# EAGLE library part DISP_TFT28_PV02808LZR50H (library dp_devices.v6)
KINGTECH PV02808LZR50H 2.8" TFT 240x320 RGB
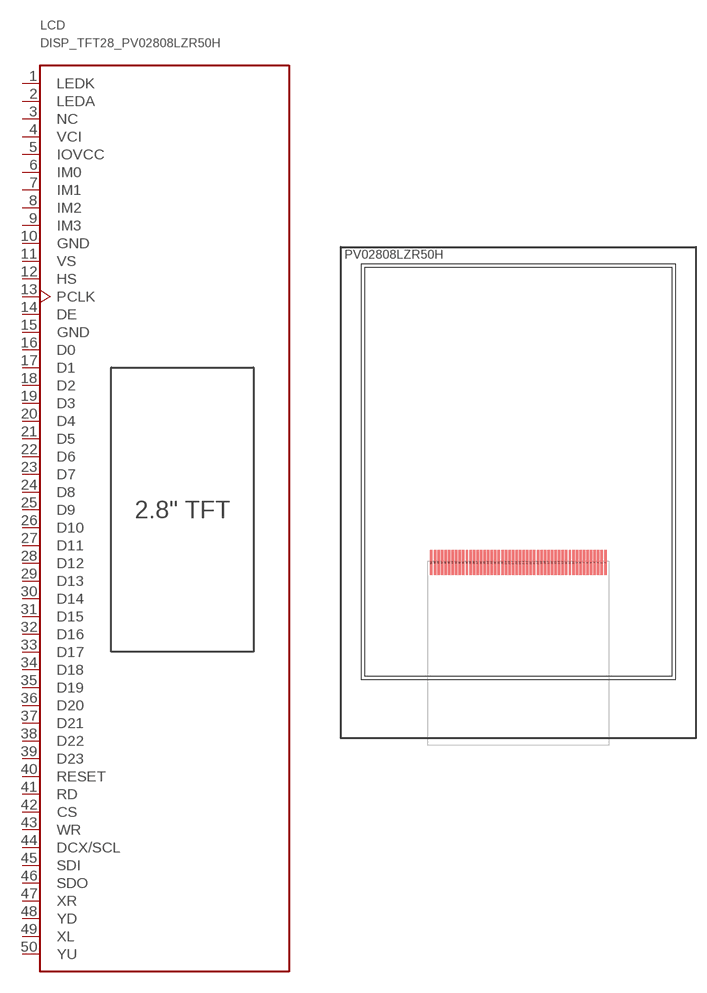
[diagram p218: symbol with the pads of PV02808LZR50H; footprint PV02808LZR50H]

Designator prefix LCD

## DISP_TFT28_PV02808LZR50H  [PV02808LZR50H]
1  LEDK  pwr
2  LEDA  pwr
3  NC  nc
4  VCI  pwr
5  IOVCC  pwr
6  IM0  in
7  IM1  in
8  IM2  in
9  IM3  in
10  GND  pwr
11  VS  in
12  HS  in
13  PCLK  in
14  DE  in
15  GND  pwr
16  D0
17  D1
18  D2
19  D3
20  D4
21  D5
22  D6
23  D7
24  D8
25  D9
26  D10
27  D11
28  D12
29  D13
30  D14
31  D15
32  D16
33  D17
34  D18
35  D19
36  D20
37  D21
38  D22
39  D23
40  RESET  in
41  RD  in
42  CS  in
43  WR  in
44  DCX/SCL  in
45  SDI
46  SDO
47  XR
48  YD
49  XL
50  YU

## Footprint PV02808LZR50H (pad centres in mm)
smd 0.35 x 3.5: 1 12.25,-12.8; 2 11.75,-12.8; 3 11.25,-12.8; 4 10.75,-12.8; 5 10.25,-12.8; 6 9.75,-12.8; 7 9.25,-12.8; 8 8.75,-12.8; 9 8.25,-12.8; 10 7.75,-12.8; 11 7.25,-12.8; 12 6.75,-12.8; 13 6.25,-12.8; 14 5.75,-12.8; 15 5.25,-12.8; 16 4.75,-12.8; 17 4.25,-12.8; 18 3.75,-12.8; 19 3.25,-12.8; 20 2.75,-12.8; 21 2.25,-12.8; 22 1.75,-12.8; 23 1.25,-12.8; 24 0.75,-12.8; 25 0.25,-12.8; 26 -0.25,-12.8; 27 -0.75,-12.8; 28 -1.25,-12.8; 29 -1.75,-12.8; 30 -2.25,-12.8; 31 -2.75,-12.8; 32 -3.25,-12.8; 33 -3.75,-12.8; 34 -4.25,-12.8; 35 -4.75,-12.8; 36 -5.25,-12.8; 37 -5.75,-12.8; 38 -6.25,-12.8; 39 -6.75,-12.8; 40 -7.25,-12.8; 41 -7.75,-12.8; 42 -8.25,-12.8; 43 -8.75,-12.8; 44 -9.25,-12.8; 45 -9.75,-12.8; 46 -10.25,-12.8; 47 -10.75,-12.8; 48 -11.25,-12.8; 49 -11.75,-12.8; 50 -12.25,-12.8